# Altium integrated library Semiconductors.IntLib: 10 symbols
Pins are listed as number, name and electrical type; pins without a type are passive.

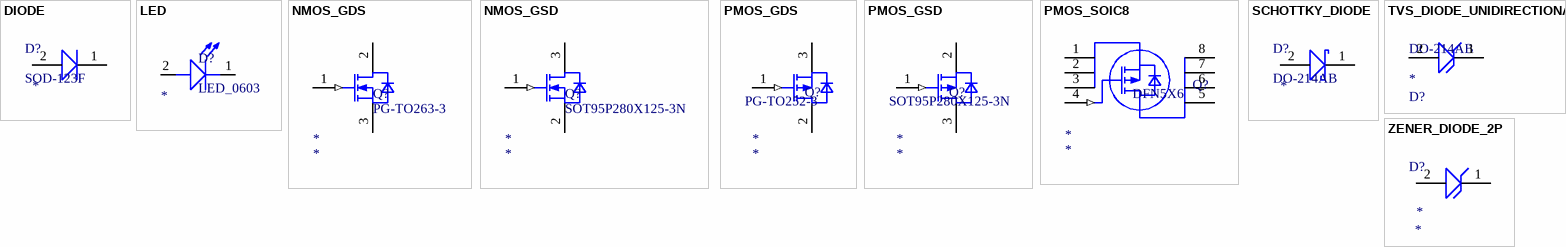
[diagram p0: symbols DIODE to ZENER_DIODE_2P]

## DIODE
designator D?
GENERIC DIODE; Pd (Max): *; LCSC Part Number: *; Vf (Max): *; If (Avg): *; Vr (Max): *; MF: *; MPN: *
footprint SOD-123F
pins: 1 K, 2 A

## LED
designator D?
GENERIC LED; MPN: *; Vf (Typ): *; Package: *; LCSC Part Number: *; If (Max): *; MF: *; Color: *
footprint LED_0603
footprint LED_0402
pins: 1 K, 2 A

## NMOS_GDS
designator Q?
GENERIC N-MOSFET 1=G, 2=D, 3=S; Channel Type: N-Channel; LCSC Part Number: *; Vds (Max): *; Id (Max): *; Vgs(th): *; MF: *; Rds(on) (Max): *; MPN: *
footprint PG-TO263-3
pins: 1 GATE (in), 2 DRAIN, 3 SOURCE

## NMOS_GSD
designator Q?
GENERIC N-MOSFET 1=G, 2=S, 3=D; Channel Type: N-Channel; LCSC Part Number: *; Vds (Max): *; Id (Max): *; Vgs(th): *; MF: *; Rds(on) (Max): *; MPN: *
footprint SOT95P280X125-3N (SOT-23 / SOT-23-3)
pins: 1 GATE (in), 2 SOURCE, 3 DRAIN

## PMOS_GDS
designator Q?
GENERIC P-MOSFET 1=G, 2=D, 3=S; Channel Type: P-Channel; LCSC Part Number: *; Vds (Max): *; Id (Max): *; Vgs(th): *; MF: *; Rds(on) (Max): *; MPN: *
footprint PG-TO252-3
pins: 1 GATE (in), 2 DRAIN, 3 SOURCE

## PMOS_GSD
designator Q?
GENERIC P-MOSFET 1=G, 2=S, 3=D; Channel Type: P-Channel; LCSC Part Number: *; Vds (Max): *; Id (Max): *; Vgs(th): *; MF: *; Rds(on) (Max): *; MPN: *
footprint SOT95P280X125-3N (SOT-23 / SOT-23-3)
pins: 1 GATE (in), 2 SOURCE, 3 DRAIN

## PMOS_SOIC8
designator Q?
GENERIC P-MOSFET SOIC8; Channel Type: P-Channel; LCSC Part Number: *; Vds (Max): *; Id (Max): *; Vgs(th): *; MF: *; Rds(on) (Max): *; MPN: *
footprint DFN5X6 (PDFN5x6 / PDFN-8)
pins: 1 SOURCE, 2 SOURCE, 3 SOURCE, 4 GATE (in), 5 DRAIN, 6 DRAIN, 7 DRAIN, 8 DRAIN

## SCHOTTKY_DIODE
designator D?
GENERIC SCHOTTKY DIODE; Pd (Max): *; LCSC Part Number: *; Vf (Max): *; If (Avg): *; Vr (Max): *; MF: *; MPN: *
footprint DO-214AB (DO-214AB / SMC)
pins: 1 K, 2 A

## TVS_DIODE_UNIDIRECTIONAL
designator D?
GENERIC TVS DIODE UNIDIRECTIONAL; Polarity: Unidirectional; LCSC Part Number: *; Ipp (Max): *; Vc (Max): *; Vrwm: *; Vbr: *; MF: *; Direction Type: Unidirectional; MPN: *
footprint DO-214AB (DO-214AB / SMC)
footprint DO-214AA (DO-214AA / SMB)
pins: 1 K, 2 A

## ZENER_DIODE_2P
designator D?
GENERIC ZENER DIODE 2P; Pd (Max): *; LCSC Part Number: *; Izt: *; MF: *; Vz: *; MPN: *
pins: 1 K, 2 A